# EAGLE library part GRF5604 (library GRF5604)
Excellent OP1dB/PSAT 190 mA Native Mode Quiescent Current Consumption 5 V Supply Voltage 50 Single-Ended Input/Output Impedances Digital Shutdown -40 to 85 C Operating Temperature Range Compact 3 x 3 mm QFN-16 Package Process: InGaP HBT Source: Datasheet
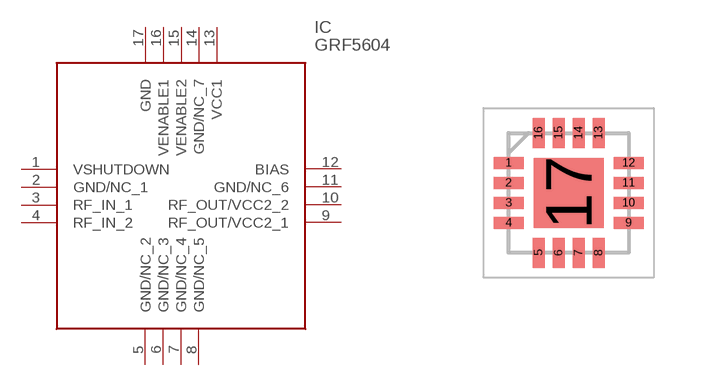
[diagram p0: symbol with the pads of QFN50P300X300X90-17N; footprint QFN50P300X300X90-17N]

Designator prefix IC

## GRF5604 (Description: Excellent OP1dB/PSAT 190 mA Native Mode Quiescent Current Consumption 5 V Supply Voltage 50 Single-Ended Input/Output Impedances Digital Shutdown -40 to 85 C Operating Temperature Range Compact 3 x 3 mm QFN-16 Package Process: InGaP HBT; Height: 0.9mm; Manufacturer_Name: Guerrilla RF; Manufacturer_Part_Number: GRF5604)  [QFN50P300X300X90-17N]
1  VSHUTDOWN
2  GND/NC_1
3  RF_IN_1
4  RF_IN_2
5  GND/NC_2
6  GND/NC_3
7  GND/NC_4
8  GND/NC_5
9  RF_OUT/VCC2_1
10  RF_OUT/VCC2_2
11  GND/NC_6
12  BIAS
13  VCC1
14  GND/NC_7
15  VENABLE2
16  VENABLE1
17  GND

## Footprint QFN50P300X300X90-17N (pad centres in mm)
QFN 16 3x3mm Package Dimensions..
smd 0.75 x 0.3: 1 -1.5,0.75; 2 -1.5,0.25; 3 -1.5,-0.25; 4 -1.5,-0.75; 9 1.5,-0.75; 10 1.5,-0.25; 11 1.5,0.25; 12 1.5,0.75
smd 0.3 x 0.75: 5 -0.75,-1.5; 6 -0.25,-1.5; 7 0.25,-1.5; 8 0.75,-1.5; 13 0.75,1.5; 14 0.25,1.5; 15 -0.25,1.5; 16 -0.75,1.5
smd 1.75 x 1.75: 17 0,0